# Altium footprint library buttons.PcbLib: 1 footprints
Each footprint in its own frame and in the unit in brackets; x right, y up, seen from the top. Pads: shape width x height; smd on the part's side, far side on the other; paste and mask are expansions set on the pad; w line width, h text height; cw(c..) or ccw(c..) is an arc to the next point about the centre after c.
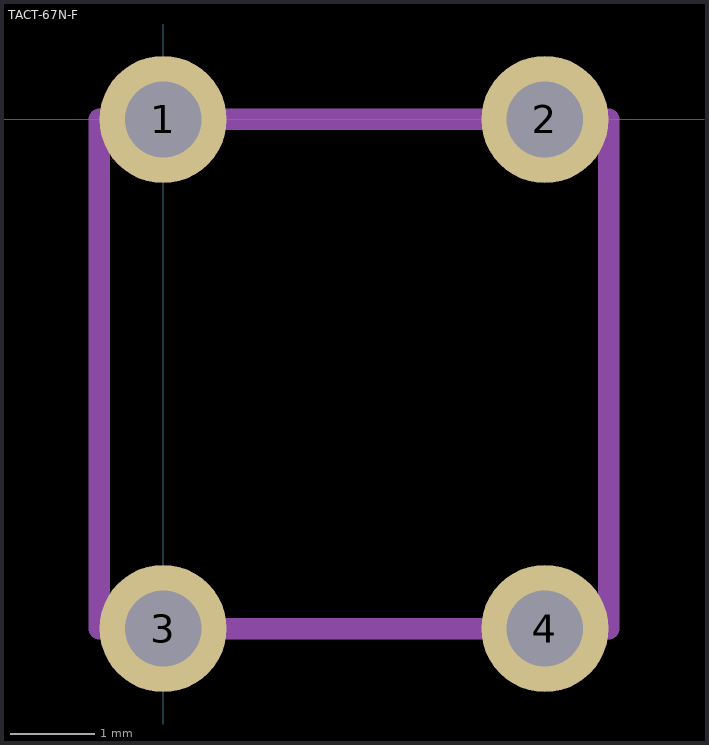
[diagram p0: the footprint, top view; thin cyan lines are the x and y axes]

## TACT-67N-F [mm] "Microswitch TACT; SPST-NO; Pos: 2; 0.05A/12VDC; THT; none; 1.6N"
pads (4):
  round 1.5 hole 0.9: 1(0,0) 2(4.5,0) 3(0,-6) 4(4.5,-6)
Top Overlay:
  text ".DESIGNATOR" at 5.73,-0.081 h1
Mechanical 1:
  lines w0.254: -0.75,-6 -0.75,0 5.25,0 5.25,-6 -0.75,-6